# Altium footprint library DT10966_MOTOR_CONTROLLER.PcbLib: 58 footprints (part 3 of 4)
Each footprint in its own frame and in the unit in brackets; x right, y up, seen from the top. Pads: shape width x height; smd on the part's side, far side on the other; paste and mask are expansions set on the pad; w line width, h text height; cw(c..) or ccw(c..) is an arc to the next point about the centre after c.
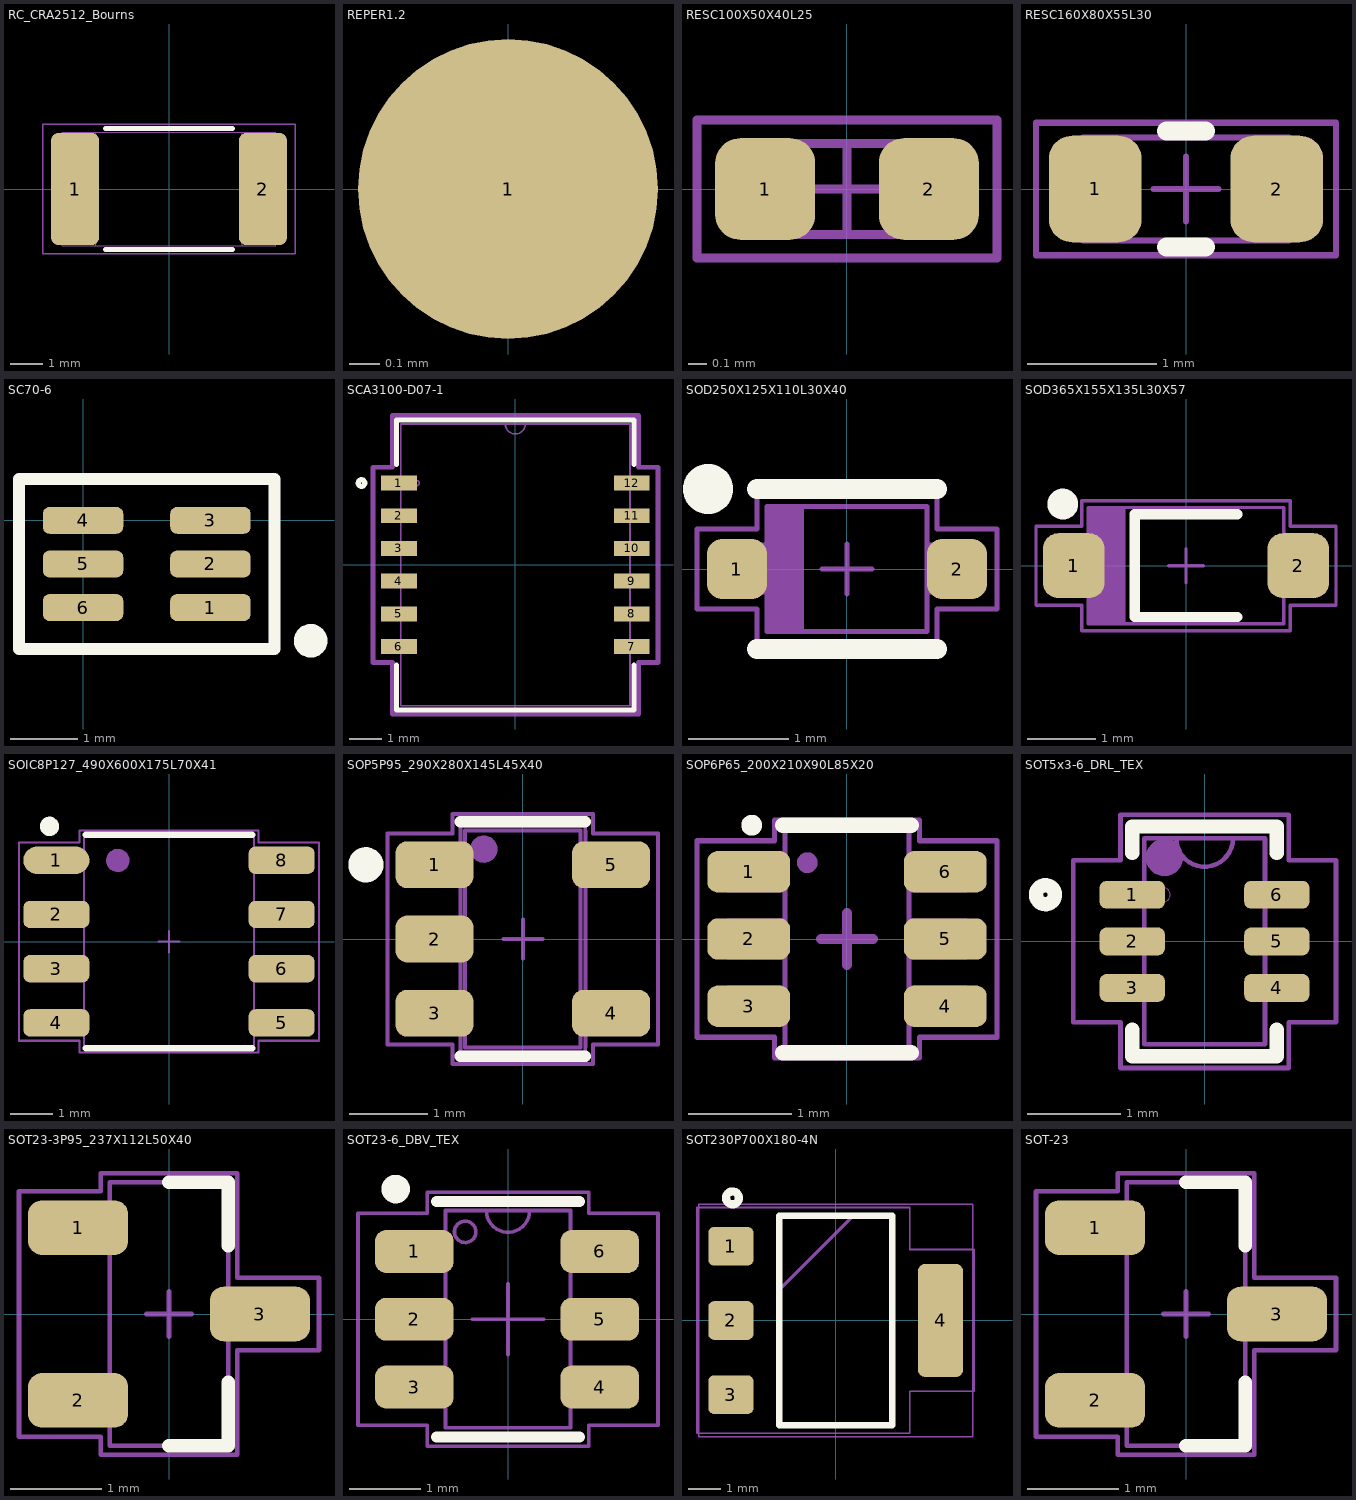
[diagram p2: the footprints below, top view; thin cyan lines are the x and y axes]

## RC_CRA2512_Bourns [mm]
height 0.55
pads (2):
  rrect30% 1.5x3.5 smd: 1(-2.934,0) 2(2.934,0)
Top Overlay:
  lines w0.152: -1.978,-1.892 1.978,-1.892 ; -1.978,1.892 1.978,1.892
Top Assembly:
  lines w0.025: -3.327,-1.765 3.327,-1.765 ; -3.327,-1.765 -3.327,1.765 ; -3.327,-1.765 -3.327,1.765 ; -3.327,-1.765 -2.286,-1.765 -2.286,1.765 -3.327,1.765 ; -3.327,1.765 3.327,1.765 ; 3.327,-1.765 3.327,1.765 ; 3.327,-1.765 3.327,1.765 ; 3.327,-1.765 2.286,-1.765 2.286,1.765 3.327,1.765
  text "'.Designator'" at -2.794,0.115 h1
Top Courtyard:
  lines w0.05: -3.937,-2.019 -3.937,2.019 3.937,2.019 3.937,-2.019 -3.937,-2.019
3D body "BO_CRA2512.step": height 0.91, standoff 0, extent -3.327,-1.765 3.327,1.765

## REPER1.2 [mm]
height 0.55
pads (1):
  round 1 smd paste-25.4 mask+0.6: 1(0,0)

## RESC100X50X40L25 [mm] "EIA 0402 (1005) T0.40 1.00x0.50x0.40"
height 0.4
pads (2):
  rrect50% 0.55x0.56 smd: 1(-0.45,0) 2(0.45,0)
Top Assembly:
  lines w0.05: -0.25,-0.25 -0.25,0.25 ; 0.25,-0.25 0.25,0.25 ; 0.5,0.25 0.5,-0.25 -0.5,-0.25 -0.5,0.25 0.5,0.25 ; 0.5,0.25 0.5,0.25
  text "'.Designator'" at -2.417,0.438 h1
Top Courtyard:
  lines w0.05: -0.25,0 0.25,0 ; 0,-0.25 0,0.25 ; -0.825,-0.38 0.825,-0.38 0.825,0.38 -0.825,0.38 -0.825,-0.38
3D body "User Library-User Library-RES0402-2.step": height 0.35, standoff 0, extent -0.5,-0.25 0.5,0.25

## RESC160X80X55L30 [mm] "EIA 0603 (1608) T0.55 1.60x0.80x0.55"
height 0.55
pads (2):
  rrect50% 0.72x0.83 smd: 1(-0.705,0) 2(0.705,0)
Top Overlay:
  lines w0.15: -0.15,-0.45 0.15,-0.45 ; -0.15,0.45 0.15,0.45
Top Assembly:
  lines w0.05: -0.5,-0.4 -0.5,0.4 ; 0.5,-0.4 0.5,0.4 ; -0.8,-0.4 -0.8,0.4 0.8,0.4 0.8,-0.4 -0.8,-0.4
  text "'.Designator'" at -2.417,0.588 h1
Top Courtyard:
  lines w0.05: -0.25,0 0.25,0 ; 0,-0.25 0,0.25 ; -1.165,-0.515 -1.165,0.515 1.165,0.515 1.165,-0.515 -1.165,-0.515
3D body "RESC1608X05N.step": height 0.45, standoff 0, extent -0.775,-0.425 0.775,0.425

## SC70-6 [mm]
height 0.55
pads (6):
  rrect50% 1.2x0.4 smd mask+0: 1(1.9,-1.3) 2(1.9,-0.65) 3(1.9,0) 4(0,0) 5(0,-0.65) 6(0,-1.3)
Top Overlay:
  circle w0.25: c3.393,-1.796 r0.125
  lines w0.18: -0.955,-1.92 -0.955,0.62 2.855,0.62 2.855,-1.92 -0.955,-1.92
Top Solder:
  rectangle: 1.203,-1.606 2.603,0.3
  rectangle: -0.697,-1.606 0.703,0.3
3D body "SC70-6.step": height 1.1, standoff 0, extent -0.125,-1.65 1.975,0.35

## SCA3100-D07-1 [mil] "12-SMD"
height 21.65
pads (12):
  rect 43x18 smd paste+0 mask+1.97: 1(-140,98.43) 2(-140,59.06) 3(-140,19.68) 4(-140,-19.68) 5(-140,-59.06) 6(-140,-98.43) 7(140,-98.43) 8(140,-59.06) 9(140,-19.68) 10(140,19.68) 11(140,59.06) 12(140,98.43)
Top Overlay:
  circle w6: c-185.04,98.43 r4
  lines w6: -143,-120.53 -143,-174.5 143,-174.5 143,-120.53 ; -143,120.53 -143,174.5 143,174.5 143,120.53
Top Assembly:
  circle w1.97: c-118.5,98.43 r3
  lines w1.97: -12,169.5 ccw(c0,169.5) 12,169.5 ; -138,-169.5 138,-169.5 138,169.5 -138,169.5 -138,-169.5
  text "'.Designator'" at -145.67,15.2 h60
Top Courtyard:
  lines w6: -171.5,-117.43 -171.5,117.43 -148,117.43 -148,179.5 148,179.5 148,117.43 171.5,117.43 171.5,-117.43 148,-117.43 148,-179.5 -148,-179.5 -148,-117.43 -171.5,-117.43
3D body "SCA3100-D04-1_MUR.step": height 130.12, standoff 0, extent -149.49,-169.49 149.49,169.49

## SOD250X125X110L30X40 [mm] "NXP SOD323, JEITA SC-76 2.5x1.25x1.1mm"
height 1.1
pads (2):
  rrect50% 0.6x0.6 smd: 1(-1.1,0) 2(1.1,0)
Top Overlay:
  circle w0.3: c-1.39,0.8 r0.1
  lines w0.2: -0.9,-0.8 0.9,-0.8 ; -0.9,0.8 0.9,0.8
Top Assembly:
  rectangle: -0.8,-0.62 -0.455,0.625
  lines w0.05: -0.8,-0.23 -1.295,-0.23 -1.295,0.24 -0.8,0.24 ; -0.455,-0.62 -0.455,0.625 ; 0.8,-0.23 1.305,-0.23 1.305,0.24 0.8,0.24 ; -0.8,-0.625 -0.8,0.625 0.8,0.625 0.8,-0.625 -0.8,-0.625
  text "'.Designator'" at -2.417,0.813 h1
Top Courtyard:
  lines w0.05: -0.25,0 0.25,0 ; 0,-0.25 0,0.25 ; -1.5,-0.4 -0.9,-0.4 -0.9,-0.725 0.9,-0.725 0.9,-0.4 1.5,-0.4 1.5,0.4 0.9,0.4 0.9,0.75 -0.9,0.75 -0.9,0.4 -1.5,0.4 -1.5,-0.4
3D body "SOD323.STEP": height 1.1, standoff 0, extent -1.35,-0.625 1.35,0.625

## SOD365X155X135L30X57 [mm] "Diodes Inc. SOD123 3.65x1.55x1.35mm"
height 1.35
pads (2):
  rrect50% 0.9x0.95 smd: 1(-1.64,0) 2(1.64,0)
Top Overlay:
  circle w0.25: c-1.8,0.9 r0.1
  lines w0.15: 0.75,-0.75 -0.75,-0.75 -0.75,0.75 0.75,0.75
Top Assembly:
  rectangle: -1.425,-0.85 -0.905,0.85
  lines w0.05: -1.43,-0.318 -1.925,-0.318 -1.925,0.318 -1.43,0.318 ; -0.905,-0.85 -0.905,0.85 ; 1.43,-0.318 1.925,-0.318 1.925,0.318 1.43,0.318 ; -1.425,-0.85 1.425,-0.85 1.425,0.85 -1.425,0.85 -1.425,-0.85
  text "'.Designator'" at -2.417,1.038 h1
Top Courtyard:
  lines w0.05: -0.25,0 0.25,0 ; 0,-0.25 0,0.25 ; -2.19,-0.575 -1.525,-0.575 -1.525,-0.95 0,-0.95 1.525,-0.95 1.525,-0.575 2.19,-0.575 2.19,0 2.19,0.575 1.525,0.575 1.525,0.95 0,0.95 -1.525,0.95 -1.525,0.575 -2.19,0.575 -2.19,0 -2.19,-0.575
3D body "SOD-123_DiodesInc.step": height 1.43, standoff -0.02, extent -1.925,-0.842 1.925,0.858

## SOIC8P127_490X600X175L70X41 [mm] "SO-8 4.9X6X1.75 p1.27 (JEDEC MS-012-AA)"
height 1.75
pads (8):
  oval 1.55x0.64 smd: 1(-2.64,1.905)
  rrect50% 1.55x0.64 smd: 2(-2.64,0.635) 3(-2.64,-0.635) 4(-2.64,-1.905) 5(2.64,-1.905) 6(2.64,-0.635) 7(2.64,0.635) 8(2.64,1.905)
Top Overlay:
  circle w0.25: c-2.8,2.7 r0.1
  lines w0.15: -1.95,-2.5 1.95,-2.5 ; -1.95,2.5 1.95,2.5
Top Assembly:
  circle w0.05: c-1.2,1.9 r0.25
  region: -1.2,1.65 -1.25,1.65 -1.342,1.688 -1.412,1.758 -1.45,1.85 -1.45,1.9 -1.45,1.95 -1.412,2.042 -1.342,2.112 -1.25,2.15 -1.2,2.15 -1.15,2.15 -1.058,2.112 -0.988,2.042 -0.95,1.95 -0.95,1.9 -0.95,1.85 -0.988,1.758 -1.058,1.688 -1.15,1.65
  lines w0.05: -2.608,-1.651 -2.608,-2.159 ; -2.586,-2.159 -2.384,-2.159 -1.994,-2.159 -1.994,-1.651 -3.099,-1.651 -3.099,-2.159 -2.709,-2.159 -2.608,-2.159 ; -2.586,-0.889 -2.384,-0.889 -1.994,-0.889 -1.994,-0.381 -2.384,-0.381 -2.586,-0.381 ; -2.586,0.381 -2.384,0.381 -1.994,0.381 -1.994,0.889 -2.384,0.889 -2.586,0.889 ; -2.586,1.651 -2.384,1.651 -1.994,1.651 -1.994,2.159 -2.384,2.159 -2.586,2.159 ; -2.586,-2.159 -2.608,-2.159 ; -2.586,-0.889 -2.608,-0.889 ; -2.586,-0.381 -2.608,-0.381 ; -2.586,0.381 -2.608,0.381 ; -2.586,0.889 -2.608,0.889 ; -2.586,1.651 -2.608,1.651 ; -2.586,2.159 -2.608,2.159 ; 2.586,1.651 2.608,1.651 ; 2.586,2.159 2.608,2.159 ; 2.586,-2.159 2.384,-2.159 1.994,-2.159 1.994,-1.651 2.384,-1.651 2.586,-1.651 ; 2.586,-0.889 2.384,-0.889 1.994,-0.889 1.994,-0.381 2.384,-0.381 2.586,-0.381 ; 2.586,0.381 2.384,0.381 1.994,0.381 1.994,0.889 2.384,0.889 2.586,0.889 ; 2.586,1.651 2.384,1.651 1.994,1.651 1.994,2.159 2.384,2.159 2.586,2.159 ; -2.608,-0.889 -2.709,-0.889 -3.099,-0.889 -3.099,-0.381 -2.709,-0.381 -2.608,-0.381 ; -2.608,-0.889 -2.608,-0.381 ; -2.608,0.381 -2.709,0.381 -3.099,0.381 -3.099,0.889 -2.709,0.889 -2.608,0.889 ; -2.608,0.381 -2.608,0.889 ; -2.608,1.651 -2.709,1.651 -3.099,1.651 -3.099,2.159 -2.709,2.159 -2.608,2.159 ; -2.608,1.651 -2.608,2.159 ; 2.608,1.651 2.709,1.651 3.099,1.651 3.099,2.159 2.709,2.159 2.608,2.159 ; 2.608,1.651 2.608,2.159 ; -1.994,-2.5 1.994,-2.5 1.994,2.5 -1.994,2.5 -1.994,-2.5 ; 2.586,-2.159 2.608,-2.159 2.709,-2.159 3.099,-2.159 3.099,-1.651 2.709,-1.651 2.608,-1.651 2.586,-1.651 2.586,-2.159 ; 2.586,-0.889 2.608,-0.889 2.709,-0.889 3.099,-0.889 3.099,-0.381 2.709,-0.381 2.608,-0.381 2.586,-0.381 2.586,-0.889 ; 2.586,0.381 2.608,0.381 2.709,0.381 3.099,0.381 3.099,0.889 2.709,0.889 2.608,0.889 2.586,0.889 2.586,0.381
  text "'.Designator'" at -2.417,-0.226 h1
Top Courtyard:
  lines w0.05: -0.25,0 0.25,0 ; 0,-0.25 0,0.25 ; -3.515,-2.325 -2.094,-2.325 -2.094,-2.6 0,-2.6 2.094,-2.6 2.094,-2.325 3.515,-2.325 3.515,0 3.515,2.325 2.094,2.325 2.094,2.6 0,2.6 -2.094,2.6 -2.094,2.325 -3.515,2.325 -3.515,0 -3.515,-2.325
3D body "SO-8 (JEDEC MS-012 AA) SOIC-8.stp": height 1.63, standoff 0, extent -3.011,-2.451 3.011,2.451

## SOP5P95_290X280X145L45X40 [mm] "TSOP5 2.9x1.6x1.45mm p0.95 (JEDEC MO-178AA) SOT-23-5"
height 1.45
pads (5):
  rrect50% 1x0.6 smd: 1(-1.13,0.95) 2(-1.13,0) 3(-1.13,-0.95) 4(1.13,-0.95) 5(1.13,0.95)
Top Overlay:
  circle w0.25: c-2.01,0.95 r0.1
  lines w0.15: -0.8,-1.5 0.8,-1.5 ; -0.8,1.5 0.8,1.5
Top Assembly:
  circle w0.05: c-0.5,1.15 r0.15
  region: -0.5,1 -0.53,1 -0.585,1.023 -0.627,1.065 -0.65,1.12 -0.65,1.15 -0.65,1.18 -0.627,1.235 -0.585,1.277 -0.53,1.3 -0.5,1.3 -0.47,1.3 -0.415,1.277 -0.373,1.235 -0.35,1.18 -0.35,1.15 -0.35,1.12 -0.373,1.065 -0.415,1.023 -0.47,1
  lines w0.05: -1.199,-1.15 -1.199,-0.75 ; -1.199,-1.15 -1.4,-1.15 -1.4,-0.75 -1.199,-0.75 ; -1.199,-1.15 -1.1,-1.15 -1.057,-1.15 -0.8,-1.15 -0.8,-0.75 -1.057,-0.75 -1.1,-0.75 -1.199,-0.75 ; -1.199,-0.2 -1.199,0.2 ; -1.199,-0.2 -1.4,-0.2 -1.4,0.2 -1.199,0.2 ; -1.199,-0.2 -1.1,-0.2 -1.057,-0.2 -0.8,-0.2 -0.8,0.2 -1.057,0.2 -1.1,0.2 -1.199,0.2 ; -1.199,0.75 -1.4,0.75 -1.4,1.15 -1.199,1.15 ; -1.199,0.75 -1.1,0.75 -1.057,0.75 -0.8,0.75 -0.8,1.15 -1.057,1.15 -1.1,1.15 -1.199,1.15 ; -1.199,0.75 -1.199,1.15 ; 1.199,-1.15 1.199,-0.75 ; 1.199,-1.15 1.1,-1.15 1.057,-1.15 0.8,-1.15 0.8,-0.75 1.057,-0.75 1.1,-0.75 1.199,-0.75 ; 1.199,-1.15 1.4,-1.15 1.4,-0.75 1.199,-0.75 ; 1.199,0.75 1.199,1.15 ; 1.199,0.75 1.1,0.75 1.057,0.75 0.8,0.75 0.8,1.15 1.057,1.15 1.1,1.15 1.199,1.15 ; 1.199,0.75 1.4,0.75 1.4,1.15 1.199,1.15 ; -0.8,-1.35 -0.8,1.35 -0.799,1.449 -0.7,1.45 0.7,1.45 0.799,1.449 0.8,1.35 0.8,-1.35 0.799,-1.449 0.7,-1.45 -0.7,-1.45 -0.799,-1.449 -0.8,-1.35 ; -0.74,-1.39 -0.74,1.39 0.74,1.39 0.74,-1.39 -0.74,-1.39
  text "'.Designator'" at 0.226,-2.417 h1
Top Courtyard:
  lines w0.05: -0.25,0 0.25,0 ; 0,-0.25 0,0.25 ; -1.73,-1.35 -0.9,-1.35 -0.9,-1.6 0,-1.6 0.9,-1.6 0.9,-1.35 1.73,-1.35 1.73,0 1.73,1.35 0.9,1.35 0.9,1.6 0,1.6 -0.9,1.6 -0.9,1.35 -1.73,1.35 -1.73,0 -1.73,-1.35
3D body "LMV321IDBVR.STEP": height 1.45, standoff 0, extent -1.4,-1.45 1.4,1.45

## SOP6P65_200X210X90L85X20 [mm] "Nexperia 2.00x2.10x0.90 p0.65 TSSOP6, SOT363, SC-88"
height 0.9
pads (6):
  rrect50% 0.8x0.4 smd mask+0.04: 1(-0.95,0.65) 2(-0.95,0) 3(-0.95,-0.65) 4(0.95,-0.65) 5(0.95,0) 6(0.95,0.65)
Top Overlay:
  circle w0.1: c-0.921,1.1 r0.05
  lines w0.15: -0.62,-1.1 0.62,-1.1 ; -0.62,1.1 0.62,1.1
Top Assembly:
  circle w0.1: c-0.384,0.738 r0.05
  lines w0.05: -1.158,-0.82 -0.601,-0.82 ; -1.151,-0.82 -1.151,-0.475 -0.601,-0.475 ; -0.601,-0.175 -1.151,-0.175 -1.151,0.175 -0.601,0.175 ; -0.601,0.475 -1.151,0.475 -1.151,0.825 -0.601,0.825 ; 0.6,-0.82 1.15,-0.82 1.15,-0.475 0.6,-0.475 ; 0.6,-0.175 1.15,-0.175 1.15,0.175 0.6,0.175 ; 0.6,0.475 1.15,0.475 1.15,0.825 0.6,0.825 ; -0.6,-1.05 -0.6,1.05 0.6,1.05 0.6,-1.05 -0.6,-1.05
  text "'.Designator'" at -2.412,1.13 h1
Top Courtyard:
  lines w0.05: -1.45,-0.95 -1.45,0.95 -0.7,0.95 -0.7,1.15 0.7,1.15 0.7,0.95 1.45,0.95 1.45,-0.95 0.7,-0.95 0.7,-1.15 -0.7,-1.15 -0.7,-0.95 -1.45,-0.95
  lines w0.1: -0.25,0 0.25,0 ; 0,-0.25 0,0.25
3D body "User Library-sot363.step": height 1, standoff 0, extent -1.15,-1.05 1.15,1.05

## SOT5x3-6_DRL_TEX [mm]
height 0.55
pads (6):
  rrect50% 0.7x0.3 smd: 1(-0.775,0.5) 2(-0.775,0) 3(-0.775,-0.5) 4(0.775,-0.5) 5(0.775,0) 6(0.775,0.5)
Top Overlay:
  circle w0.152: c-1.707,0.5 r0.102
  lines w0.152: -0.775,-0.947 -0.775,-1.232 0.775,-1.232 0.775,-0.947 ; -0.775,0.947 -0.775,1.232 0.775,1.232 0.775,0.947
Top Assembly:
  circle w0.2: c-0.432,0.9 r0.1
  lines w0.05: -0.305,1.105 ccw(c0,1.105) 0.305,1.105 ; -0.648,-1.105 -0.648,1.105 0.648,1.105 0.648,-1.105 -0.648,-1.105
  text "'.Designator'" at 0.226,-2.417 h1
Top 3D Body:
  circle w0: c-0.445,0.5 r0.076
Top Courtyard:
  lines w0.05: -1.41,-0.868 -0.902,-0.868 -0.902,-1.359 0.902,-1.359 0.902,-0.868 1.41,-0.868 1.41,0.868 0.902,0.868 0.902,1.359 -0.902,1.359 -0.902,0.868 -1.41,0.868 -1.41,-0.868
3D body "SOT5x3-6_DRL_TEX.step": height 0.61, standoff 0, extent -0.851,-1.105 0.851,1.105

## SOT23-3P95_237X112L50X40 [mm] "SOT-23-3 2.90x1.30x1.10 p0.95 (JEDEC TO-236AB)"
height 1.1
pads (3):
  rrect50% 1.1x0.6 smd: 1(-1,0.95) 2(-1,-0.95) 3(1,0)
Top Overlay:
  lines w0.15: 0,-1.45 0.65,-1.45 0.65,-0.75 ; 0,1.45 0.65,1.45 0.65,0.75
Top Assembly:
  lines w0.05: -0.79,-1.15 -0.79,-0.95 -0.79,-0.75 ; -0.79,0.75 -0.79,0.95 -0.79,1.15 ; -0.65,-1.15 -1.19,-1.15 -1.19,-0.95 -1.19,-0.75 -0.65,-0.75 ; -0.65,0.75 -1.19,0.75 -1.19,0.95 -1.19,1.15 -0.65,1.15 ; 0.65,-0.2 1.19,-0.2 1.19,0 1.19,0.2 0.65,0.2 ; 0.79,-0.2 0.79,0 0.79,0.2 ; -0.65,-1.45 -0.65,0 -0.65,1.45 0.65,1.45 0.65,0 0.65,-1.45 -0.65,-1.45
  text "'.Designator'" at -0.226,2.417 h1
Top Courtyard:
  lines w0.05: -0.25,0 0.25,0 ; 0,-0.25 0,0.25 ; -1.65,-1.35 -1.65,1.35 -0.75,1.35 -0.75,1.55 0.75,1.55 0.75,0.4 1.65,0.4 1.65,-0.4 0.75,-0.4 0.75,-1.55 -0.75,-1.55 -0.75,-1.35 -1.65,-1.35
3D body "SOT23-3P95_237X112L50X40 (JEDEC TO-236AB).step": height 0.91, standoff -0.04, extent -1.2,-1.45 1.2,1.45

## SOT23-6_DBV_TEX [mm]
height 0.55
pads (6):
  rrect50% 1.1x0.6 smd: 1(-1.312,0.95) 2(-1.312,0) 3(-1.312,-0.95) 4(1.287,-0.95) 5(1.287,0) 6(1.287,0.95)
Top Overlay:
  circle w0.2: c-1.575,1.825 r0.1
  lines w0.152: -1.003,-1.651 1.003,-1.651 ; -1.003,1.651 1.003,1.651
Top Assembly:
  circle w0.05: c-0.6,1.225 r0.15
  lines w0.05: -0.305,1.524 ccw(c0,1.524) 0.305,1.524 ; -1.499,-1.204 -0.876,-1.204 -0.876,-0.696 -1.499,-0.696 -1.499,-1.204 ; -1.499,-0.254 -1.499,0.254 -0.876,0.254 -0.876,-0.254 -1.499,-0.254 ; -1.499,0.696 -1.499,1.204 -0.876,1.204 -0.876,0.696 -1.499,0.696 ; -0.876,-1.524 -0.876,1.524 0.876,1.524 0.876,-1.524 -0.876,-1.524 ; 0.876,-1.204 1.499,-1.204 1.499,-0.696 0.876,-0.696 0.876,-1.204 ; 0.876,-0.254 1.499,-0.254 1.499,0.254 0.876,0.254 0.876,-0.254 ; 0.876,0.696 1.499,0.696 1.499,1.204 0.876,1.204 0.876,0.696
  text "'.Designator'" at -2.692,-0.212 h1
Top Courtyard:
  lines w0.05: -0.5,0 0.5,0 ; 0,-0.5 0,0.5 ; -2.103,-1.483 -2.103,1.483 -1.13,1.483 -1.13,1.778 1.13,1.778 1.13,1.483 2.103,1.483 2.103,-1.483 1.13,-1.483 1.13,-1.778 -1.13,-1.778 -1.13,-1.483 -2.103,-1.483
3D body "SOT23-6_DBV_TEX.step": height 1.45, standoff 0, extent -1.499,-1.524 1.499,1.524

## SOT230P700X180-4N [mm]
pads (4):
  rrect30% 1.4x1.2 smd: 1(-3.25,2.3) 2(-3.25,0) 3(-3.25,-2.3)
  rrect30% 1.4x3.5 smd: 4(3.25,0)
Top Overlay:
  circle w0.254: c-3.2,3.8 r0.2
  lines w0.2: -1.75,-3.25 1.75,-3.25 1.75,3.25 -1.75,3.25 -1.75,-3.25
Top Courtyard:
  lines w0.05: -4.3,-3.5 -4.3,3.5 2.3,3.5 2.3,2.2 4.3,2.2 4.3,-2.2 2.3,-2.2 2.3,-3.5 -4.3,-3.5
Mechanical 20:
  lines w0.05: -4.25,-3.6 4.25,-3.6 4.25,3.6 -4.25,3.6 -4.25,-3.6
Mechanical 21:
  lines w0.1: -1.75,0.95 0.55,3.25 ; -1.75,-3.25 -1.75,3.25 1.75,3.25 1.75,-3.25 -1.75,-3.25
3D body "BSP129H6327XTSA1.stp": height 1.8, standoff 0, extent -3.5,-3.25 3.5,3.25

## SOT-23 [mm]
height 0.55
pads (3):
  rrect50% 1.1x0.6 smd: 1(-1,0.95) 2(-1,-0.95) 3(1,0)
Top Overlay:
  lines w0.15: 0,-1.45 0.65,-1.45 0.65,-0.75 ; 0,1.45 0.65,1.45 0.65,0.75
Top Assembly:
  lines w0.05: -0.79,-1.15 -0.79,-0.95 -0.79,-0.75 ; -0.79,0.75 -0.79,0.95 -0.79,1.15 ; -0.65,-1.15 -1.19,-1.15 -1.19,-0.95 -1.19,-0.75 -0.65,-0.75 ; -0.65,0.75 -1.19,0.75 -1.19,0.95 -1.19,1.15 -0.65,1.15 ; 0.65,-0.2 1.19,-0.2 1.19,0 1.19,0.2 0.65,0.2 ; 0.79,-0.2 0.79,0 0.79,0.2 ; -0.65,-1.45 0.65,-1.45 0.65,0 0.65,1.45 -0.65,1.45 -0.65,0 -0.65,-1.45
  text "'.Designator'" at -0.226,2.417 h1
Top Courtyard:
  lines w0.05: -0.25,0 0.25,0 ; 0,-0.25 0,0.25 ; -1.65,-1.35 -0.75,-1.35 -0.75,-1.55 0.75,-1.55 0.75,-0.4 1.65,-0.4 1.65,0.4 0.75,0.4 0.75,1.55 -0.75,1.55 -0.75,1.35 -1.65,1.35 -1.65,-1.35
3D body "SOT23.step": height 0.91, standoff -0.04, extent -1.2,-1.45 1.2,1.45